# EAGLE library part SG3525 (library madhu)
ST Microelectronics REGULATING PULSE WIDTH MODULATORS
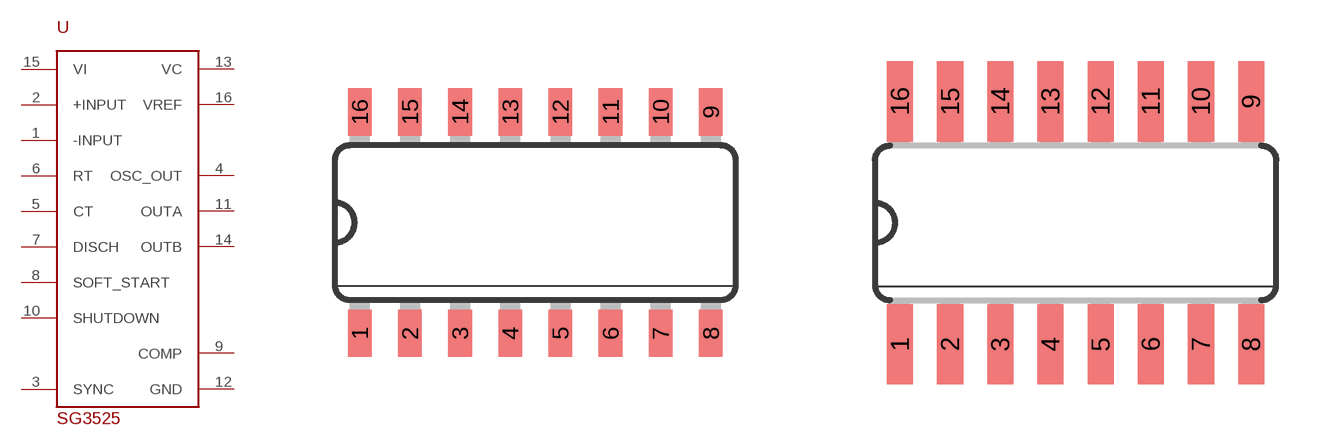
[diagram p24: symbol with the pads of SOIC-16; footprints SOIC-16, SO16]

Designator prefix U

## SG3525APN  [SOIC-16]
1  -INPUT  out
2  +INPUT  sup
3  SYNC  out
4  OSC_OUT  out
5  CT  in
6  RT  out
7  DISCH  out
8  SOFT_START  sup
9  COMP  sup
10  SHUTDOWN  in
11  OUTA  sup
12  GND  sup
13  VC  sup
14  OUTB  sup
15  VI  sup
16  VREF  sup

## SG3525AP  [SO16]
Pads as for SOIC-16

## Footprint SOIC-16 (pad centres in mm)
Small Outline package 150 mil
smd 0.6 x 1.2: 1 -4.445,-2.8; 2 -3.175,-2.8; 3 -1.905,-2.8; 4 -0.635,-2.8; 5 0.635,-2.8; 6 1.905,-2.8; 7 3.175,-2.8; 8 4.445,-2.8; 9 4.445,2.8; 10 3.175,2.8; 11 1.905,2.8; 12 0.635,2.8; 13 -0.635,2.8; 14 -1.905,2.8; 15 -3.175,2.8; 16 -4.445,2.8

## Footprint SO16 (pad centres in mm)
Small Outline package 150 mil
smd 0.66 x 2.032: 1 -4.445,-3.073; 2 -3.175,-3.073; 3 -1.905,-3.073; 4 -0.635,-3.073; 5 0.635,-3.073; 6 1.905,-3.073; 7 3.175,-3.073; 8 4.445,-3.073; 9 4.445,3.073; 10 3.175,3.073; 11 1.905,3.073; 12 0.635,3.073; 13 -0.635,3.073; 14 -1.905,3.073; 15 -3.175,3.073; 16 -4.445,3.073